# Altium footprint library Relay.PcbLib: 36 footprints (part 3 of 3)
Each footprint in its own frame and in the unit in brackets; x right, y up, seen from the top. Pads: shape width x height; smd on the part's side, far side on the other; paste and mask are expansions set on the pad; w line width, h text height; cw(c..) or ccw(c..) is an arc to the next point about the centre after c.
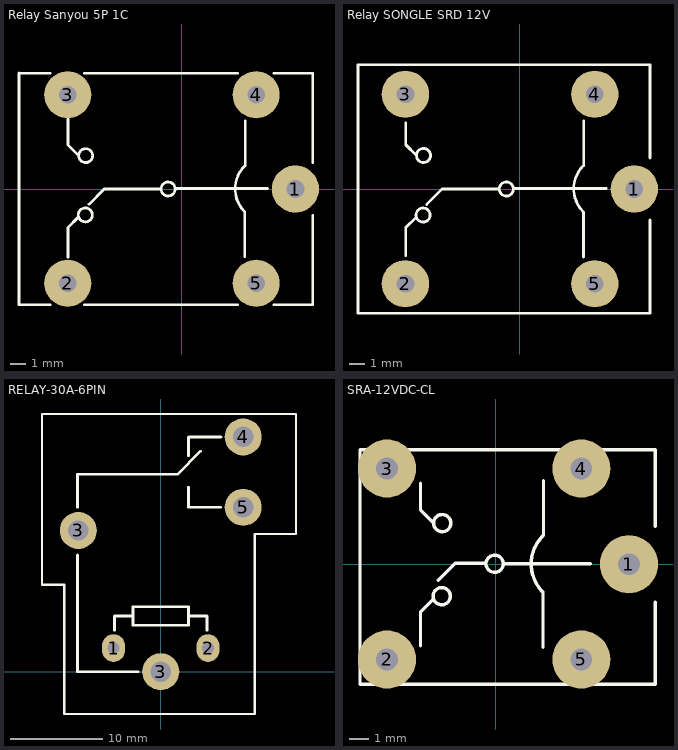
[diagram p2: the footprints below, top view; thin cyan lines are the x and y axes]

## Relay Sanyou 5P 1C [mil] "SANYOU 5 Pin 1C"
height 800
pads (5):
  round 120 hole 45: 1(290,0) 2(-290,-240) 3(-290,240) 4(190,240) 5(190,-240)
Top Overlay:
  circle w7: c-245.2,-66 r17.8
  circle w7: c-34.2,0 r17.8
  circle w7: c-244.2,85 r17.8
  lines w7: -414,295 -335,295 ; -414,295.28 -414,-295 -335,-295 ; -289,-174 -289,-98 -263,-72 ; -289,178 -289,112 -262,85 ; -247,-295 143,-295 ; -247,295 143,295 ; -236,-39 -197,0 -54,0 ; -14,1 219,1 ; 160,-57 cw(c218.5,0.5) 161,59 ; 161,-172 161,-58 ; 162,60 162,173 ; 235,-295 334,-295 334,-66.65 ; 235,295 334,295 334,66.65
Top Designator:
  text ".Designator" at -177.83,-13.54 h60
3D body "relay srd05vdc-sl-c.SLDPRT": height 594.88, standoff -173.23, extent -414.02,-295.28 334.01,295.27

## Relay SONGLE SRD 12V [mil] "Relay SPDT, 5 pin, 10A,W 650mil, L 800mil, H 800mil"
height 800
pads (5):
  round 120 hole 45: 1(290,0) 2(-290,-240) 3(-290,240) 4(190,240) 5(190,-240)
Top Overlay:
  circle w7: c-34.2,0 r17.8
  circle w7: c-245.2,-66 r17.8
  circle w7: c-244.2,85 r17.8
  lines w7: -289,-169 -289,-98 -263,-72 ; -289,168 -289,112 -262,85 ; -236,-39 -197,0 -54,0 ; -14,1 219,1 ; 160,-57 cw(c218.5,0.5) 161,59 ; 161,-172 161,-58 ; 162,60 162,173 ; 330,-78.78 330,-315 -410,-315 -410,315 330,315 330,78.78
Top Designator:
  text ".Designator" at -182.55,-13.54 h60
3D body "relay SRD-12v.stp": height 625.98, standoff -110.24, extent -426.95,-307.09 328.95,307.09

## RELAY-30A-6PIN [mm]
pads (6):
  oval 2.5x3 hole 1.3: 1(-5.1,2.54) 2(5.1,2.54)
  round 4 hole 2.2: 3(-8.9,15.24) 3(0,0) 4(8.9,25.34) 5(8.9,17.74)
Top Overlay:
  lines w0.254: -12.827,9.398 -10.414,9.398 -10.414,-4.572 10.16,-4.572 10.16,14.859 14.605,14.859 14.605,27.813 -12.827,27.813 -12.827,9.398
  lines w0.3: -9,12.598 -9,0 -2.438,0 ; -9,17.74 -9,21.3 1.8,21.3 4.3,23.8 ; -5,4.47 -5,6 -3,6 ; 3,6 5,6 5,4.47 ; 3,19.9 3,17.74 6.477,17.74 ; 3,23.3 3,25.3 ; 3.04,25.34 6.502,25.34 ; -3,5 3,5 3,7 -3,7 -3,5
Top Designator:
  text ".Designator" at -2.821,11.277 h1.52
3D body "Relay - SLA-05VDC-SL-C.stp": height 20.12, standoff -3.4, extent -12.954,-3.861 14.122,27.737

## SRA-12VDC-CL [mil] "Relay SPDT, 5 pin, 10A,W 650mil, L 800mil, H 800mil"
height 800
pads (5):
  round 120 hole 45: 1(275.59,0) 2(-224.41,-196.85) 3(-224.41,197.85) 4(177.17,197.85) 5(177.17,-196.85)
Top Overlay:
  circle w7: c-110.34,85 r17.8
  circle w7: c-111.34,-66 r17.8
  circle w7: c-2.06,1 r17.8
  lines w7: -280.24,236.22 -280.24,-248.03 330,-248.07 330,-78.74 ; -280.24,236.26 330,236.26 330,78.74 ; -155.14,-169 -155.14,-98 -129.14,-72 ; -155.14,168 -155.14,112 -128.14,85 ; -118.76,-32.88 -83.88,2 -19.83,2 ; 15.75,1 195.38,1 ; 97.01,-57 cw(c155.51,0.5) 98.01,59 ; 98.01,-172 98.01,-58 ; 99.01,60 99.01,173
Top Designator:
  text ".Designator" at -120.49,-13.04 h60